# Altium schematic symbol library Mosfet.SchLib: 175 symbols (part 1 of 4)
Pins are listed as number, name and electrical type; pins without a type are passive.

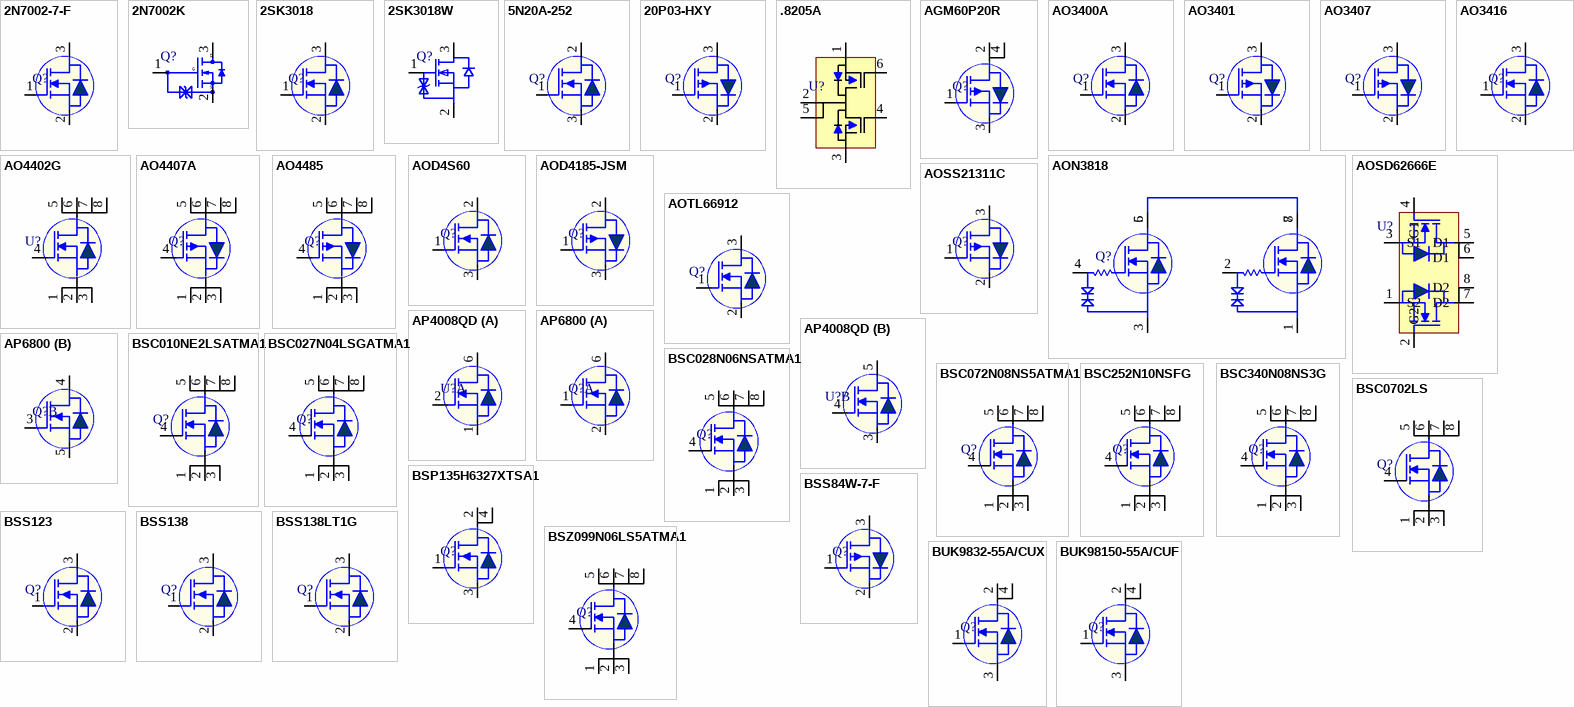
[diagram p0: symbols 2N7002-7-F to BUK98150-55A/CUF]

## 2N7002-7-F
designator Q?
MOSFET N-CH 60V 115MA SOT23-3; Manufacturer: Diodes; Manufacturer Part Number: 2N7002-7-F; Item Type: MOSFETs; Nominal Vgs: 2.5V; Max Power Dissipation: 300mW; Rds On Max: 7.5R; Input Capacitance: 50pF; Number of Elements: 1; Drain to Source Breakdown Voltage: 70V; Gate to Source Voltage (Vgs): 20V; Turn-Off Delay Time: 11ns; Turn-On Delay Time: 7ns; Power Dissipation: 540mW; Element Configuration: Single; Polarity: N-CHANNEL; Rise Time: 3ns; Fall Time: 5.6ns; Supplier 1: RSComponents; RoHS: Yes; Stock 1: 21000; Pricing 1: 3000=0.03200, 6000=0.03100, 15000=0.02900, 30000=0.02700 (GBP); Mount: Surface Mount; Case/Package: SOT-23; LCSC Part Number: C85049; Weight: 0.000282oz; Contact Plating: Tin,Matte; Min Operating Temperature: -55°C; Max Operating Temperature: 150°C; Drain to Source Voltage (Vdss): 60V; Continuous Drain Current (ID): 115mA; Packaging: Tape and Reel; Package Quantity: 3000; Dual Supply Voltage: 60V; Number of Channels: 1; Drain to Source Resistance: 7.5R; On-State Resistance: 7.5R; Threshold Voltage: 2.5V; Termination: SMD/SMT; Voltage Rating (DC): 60V; Current Rating: 115mA; Series: -; Drain-source On Resistance-Max: 7.5R; Voltage: 60V; Length: 2.9mm; Width: 1.3mm; Height: 1mm; Radiation Hardening: No; REACH SVHC: No SVHC; Lead Free: Lead Free; RoHS Compliant: Yes; ComponentLink1URL: https://datasheet.ciiva.com/15219/getdatasheetpartid-110059-15219667.pdf?src-supplier=Verical; ComponentLink1Description: https://datasheet.ciiva.com/15219/getdatasheetpartid-110059-15219667.pdf?src-supplier=Verical; ComponentLink2URL: https://datasheet.ciiva.com/3304/ds11303-3304385.pdf?src-supplier=Avnet; ComponentLink2Description: https://datasheet.ciiva.com/3304/ds11303-3304385.pdf?src-supplier=Avnet; ComponentLink3URL: https://datasheet.ciiva.com/1188/ds11303-1188363.pdf?src-supplier=Element14; ComponentLink3Description: https://datasheet.ciiva.com/1188/ds11303-1188363.pdf?src-supplier=Element14; ComponentLink4URL: https://datasheet.ciiva.com/22712/1915452-22712375.pdf?src-supplier=Element14; ComponentLink4Description: https://datasheet.ciiva.com/22712/1915452-22712375.pdf?src-supplier=Element14; ComponentLink5URL: https://datasheet.ciiva.com/49020/70437206-49020102.pdf?src-supplier=Allied+Electronics; ComponentLink5Description: https://datasheet.ciiva.com/49020/70437206-49020102.pdf?src-supplier=Allied+Electronics; Supplier Part Number 1: 1220588
footprint SOT-23 (TRANS NPN 40V 0.6A SOT23)
pins: 1 G, 2 S, 3 D

## 2N7002K
designator Q?
60V 300mA 350mW 2.2Ω@10V,0.3A 1.6V 1 N-channel SOT-23 MOSFETs ROHS; Manufacturer: MSKSEMI; Manufacturer Part Number: 2N7002K; Item Type: Mosfet; Package: SOT-23; LCSC Part Number: C3008053; ComponentLink1Description: LCSC; ComponentLink1URL: https://www.lcsc.com/product-detail/MOSFETs_MSKSEMI-2N7002K_C3008053.html?s_z=n_C3008053
footprint SOT-23 (TRANS NPN 40V 0.6A SOT23)
pins: 1 G, 2 S, 3 D

## 2SK3018
designator Q?
30V 100mA 200mW 8Ω@4V,10mA N Channel SOT-23 MOSFETs ROHS; Manufacturer: KUU; Manufacturer Part Number: 2SK3018; Item Type: MOSFET; Package: SOT-23; LCSC Part Number: C2944164; ComponentLink1Description: LCSC; ComponentLink1URL: https://www.lcsc.com/product-detail/MOSFETs_KUU-2SK3018_C2944164.html
footprint SOT-23 (TRANS NPN 40V 0.6A SOT23)
pins: 1 G, 2 S, 3 D

## 2SK3018W
designator Q?
30V 100mA 200mW 13Ω@2.5V,1mA 1.5V 1 N-channel SOT-323 MOSFETs ROHS; Manufacturer: TWGMC; Manufacturer Part Number: 2SK3018W; Item Type: Mosfet; Package: SOT-323; LCSC Part Number: C5273793; ComponentLink1Description: LCSC; ComponentLink1URL: https://www.lcsc.com/product-detail/MOSFETs_TWGMC-2SK3018W_C5273793.html?s_z=n_2SK3018T106
footprint SOT-323
pins: 1 G, 2 S, 3 D

## 5N20A-252
designator Q?
200V 5A 78W 580mΩ@10V,2.5A 3V@250uA N Channel TO-252-2(DPAK) MOSFETs ROHS; Manufacturer: GOFRD; Manufacturer Part Number: 5N20A-252; Item Type: Mosfet; Package: TO-252-2(DPAK); LCSC Part Number: C224101; ComponentLink1Description: LCSC; ComponentLink1URL: https://www.lcsc.com/product-detail/MOSFETs_GOFORD-5N20A-252_C224101.html
footprint DPAK
pins: 1 G, 2 D, 3 S

## 20P03-HXY
designator Q?
30V 20A 29W 39mΩ@10V,15A 2.5V@250uA P Channel 1345pF@15V TO-252-2L MOSFETs ROHS; Manufacturer: HXY MOSFET; Manufacturer Part Number: 20P03-HXY; Item Type: Mosfet; Package: TO-252-2L; LCSC Part Number: C4748750; ComponentLink1Description: LCSC; ComponentLink1URL: https://www.lcsc.com/product-detail/MOSFETs_HXY-MOSFET-20P03-HXY_C4748750.html
footprint 20P03-HXY
pins: 1 G, 2 S, 3 D

## .8205A
designator U?
20V 6A 22mΩ@4.5V,4.5A 2W 2PCSNChannel(Common Drain) SOT-23-6 MOSFETs ROHS; Manufacturer: Shenzhen Fuman Elec; Manufacturer Part Number: .8205A; Item Type: IC; ComponentLink1Description: LCSC; ComponentLink1URL: https://www.lcsc.com/product-detail/MOSFETs_Shenzhen-Fuman-Elec-8205A_C841290.html; Package: SOT-23-6; LCSC Part Number: C841290
footprint SOT-23-6
pins: 1 S1, 2 D, 3 S2, 4 G2, 5 D, 6 G1

## AGM60P20R
designator Q?
60V 10A 65mΩ@10V,5A 3W 1.8V@250uA 1 Piece P-Channel SOT-223 MOSFETs ROHS; Manufacturer: AGM-Semi; Manufacturer Part Number: AGM60P20R; Package: SOT-223; LCSC Part Number: C6719402; Item Type: MOSFETs; ComponentLink1Description: LCSC; ComponentLink1URL: https://www.lcsc.com/product-detail/MOSFETs_AGM-Semi-AGM60P20R_C6719402.html
footprint SOT- 223
pins: 1 G, 2 D, 3 S, 4 D

## AO3400A
designator Q?
30V 5.8A 32mΩ@10V,5.8A 1.4W 1.4V@250uA N Channel SOT-23 MOSFETs ROHS; Manufacturer: BORN; Manufacturer Part Number: AO3400A; Item Type: Mosfet; ComponentLink1Description: LCSC; ComponentLink1URL: https://www.lcsc.com/product-detail/MOSFETs_BORN-AO3400A_C344010.html; Footprint: SOT-23; LCSC Part Number: C344010
footprint sot-23
pins: 1 G, 2 S, 3 D

## AO3401
designator Q?
Trans Mosfet P-ch 30V 4A 3-PIN SOT-23 T/r; Manufacturer: Alpha & Omega Semiconductor; Manufacturer Part Number: AO3401A; Rds On Max: 44mR; Input Capacitance: 1.2nF; Max Power Dissipation: 1.4W; Number of Elements: 1; Supplier 1: Arrow Electronics; RoHS: Yes; Category: MOSFETs; Mount: Surface Mount; Case/Package: TO-236-3; Number of Pins: 3; Min Operating Temperature: -55°C; Max Operating Temperature: 150°C; Packaging: Tape and Reel; Drain to Source Voltage (Vdss): 30V; Continuous Drain Current (ID): 4A; Power Dissipation: 1.4W; Series: -; Radiation Hardening: No; RoHS Compliant: Yes; Lead Free: Lead Free; ComponentLink1URL: https://datasheet.ciiva.com/940/ao3401a-940720.pdf?src-supplier=Digi-Key; ComponentLink1Description: https://datasheet.ciiva.com/940/ao3401a-940720.pdf?src-supplier=Digi-Key; ComponentLink2URL: https://datasheet.ciiva.com/26927/getdatasheetpartid-79048-26927888.pdf?src-supplier=Verical; ComponentLink2Description: https://datasheet.ciiva.com/26927/getdatasheetpartid-79048-26927888.pdf?src-supplier=Verical; Supplier Part Number 1: AO3401A; LCSC Part Number: C181091; Item Type: Mosfet
footprint SOT-23 (TRANS NPN 40V 0.6A SOT23)
pins: 1 G, 2 S, 3 D

## AO3407
designator Q?
30V 4.1A 60mΩ@10V,4.1A 350mW 3V@250uA P Channel SOT-23 MOSFETs ROHS; Manufacturer: Guangdong Hottech; Manufacturer Part Number: AO3407; Item Type: Mosfet; Package: SOT-23; LCSC Part Number: C181093; ComponentLink1Description: LCSC; ComponentLink1URL: https://www.lcsc.com/product-detail/MOSFETs_Guangdong-Hottech-AO3407_C181093.html
footprint SOT-23 (TRANS NPN 40V 0.6A SOT23)
pins: 1 G, 2 S, 3 D

## AO3416
designator Q?
SOT-23 MOSFETs ROHS; Manufacturer Part Number: AO3416; Manufacturer: TECH PUBLIC; Item Type: Mosfet; Package: SOT-23; LCSC Part Number: C5123927; ComponentLink1Description: LCSC; ComponentLink1URL: https://www.lcsc.com/product-detail/MOSFETs_TECH-PUBLIC-AO3416_C5123927.html
footprint Sot-23 (TRANS NPN 40V 0.6A SOT23)
pins: 1 G, 2 S, 3 D

## AO4402G
designator U?
Mosfet N-ch 20V 20A 8SOIC; Manufacturer: Alpha & Omega Semiconductor; Manufacturer Part Number: AO4402G; Supplier: Digi-Key; Supplier Part Number: 785-AO4402GTR-ND; RoHS: No; Category: Transistors; Pricing: 3000=0.47628 (USD); LCSC Part Number: C2931062; Item Type: Mosfet; ComponentLink1Description: LCSC; ComponentLink1URL: https://www.lcsc.com/product-detail/MOSFETs_Alpha-Omega-Semicon-AO4402G_C2931062.html
footprint SOIC-8
pins: 1 S, 2 S, 3 S, 4 G, 5 D, 6 D, 7 D, 8 D

## AO4407A
designator Q?
30V 13A 9mΩ 1.5W 1V@250uA 1 piece P-channel SOP-8 MOSFETs ROHS; Manufacturer: JSMSEMI; Manufacturer Part Number: AO4407A; Item Type: Mosfet; Package: SOP-8; LCSC Part Number: C5155211; ComponentLink1Description: LCSC; ComponentLink1URL: https://www.lcsc.com/product-detail/MOSFETs_JSMSEMI-AO4407A_C5155211.html
footprint SOP-8
pins: 1 S, 2 S, 3 S, 4 G, 5 D, 6 D, 7 D, 8 D

## AO4485
designator Q?
MOSFET P-CH 40V 10A 8SOIC; Manufacturer: Alpha & Omega Semiconductor; Manufacturer Part Number: AO4485; Item Type: MOSFETs; Supplier: Digikey; LCSC Part Number: C51499; RoHS: Yes; Stock: 22089; Pricing: 1=0.89, 10=0.768, 100=0.5318, 500=0.44432, 1000=0.37814 (USD); ComponentLink1URL: https://datasheet.ciiva.com/26861/getdatasheetpartid-417133-26861485.pdf?src-supplier=Verical; ComponentLink1Description: https://datasheet.ciiva.com/26861/getdatasheetpartid-417133-26861485.pdf?src-supplier=Verical; ComponentLink2URL: https://datasheet.ciiva.com/6367/ao4485-6367585.pdf?src-supplier=Digikey; ComponentLink2Description: https://datasheet.ciiva.com/6367/ao4485-6367585.pdf?src-supplier=Digikey
footprint SOIC-8
pins: 1 S, 2 S, 3 S, 4 G, 5 D, 6 D, 7 D, 8 D

## AOD4S60
designator Q?
MOSFET N-CH 600V 4A TO252; Manufacturer: Alpha & Omega Semiconductor; Manufacturer Part Number: AOD4S60; Rds On Max: 900mR; Input Capacitance: 263pF; Max Power Dissipation: 56.8W; Supplier: Digikey; RoHS: Yes; Item Type: Mosfet; Stock: 4197; Pricing: 1=1.32, 10=1.08, 100=0.8399, 500=0.71192, 1000=0.57994 (USD); Mounting Technology: Surface Mount; Case/Package: TO-252-3; Packaging: Cut Tape; Drain to Source Voltage (Vdss): 600V; Continuous Drain Current (ID): 4A; Series: aMOS™; Package Quantity: 1; RoHS Compliant: Yes; ComponentLink1URL: https://datasheet.ciiva.com/6367/aod4s60-6367632.pdf?src-supplier=Digikey; ComponentLink1Description: https://datasheet.ciiva.com/6367/aod4s60-6367632.pdf?src-supplier=Digikey
footprint TO-252-2L
pins: 1 G, 2 D, 3 S

## AOD4185-JSM
designator Q?
40V 12A 11mΩ@10V,15A 6.3W 1.4V 1 piece P-channel TO-252 MOSFETs ROHS; Manufacturer: JSMSEMI; Manufacturer Part Number: AOD4185-JSM; Item Type: Mosfet; Package: TO-252; LCSC Part Number: C18189874; ComponentLink1Description: LCSC; ComponentLink1URL: https://www.lcsc.com/product-detail/MOSFETs_JSMSEMI-AOD4185-JSM_C18189874.html
footprint TO-252-2L
pins: 1 G, 2 D, 3 S

## AON3818
designator Q?
24V 8A 21mΩ@2.5V 2.7W 1.2V@250uA 2 N-Channel DFN-8(3x3) MOSFETs ROHS; Manufacturer: AOS; Manufacturer Part Number: AON3818; Item Type: Mosfet; Package: DFN-8(3x3); LCSC Part Number: C357850
footprint DFN-8(3x3)
pins: 1 S2, 2 G2, 3 S1, 4 G1, 5 D2, 6 D2, 7 D1, 8 D1

## AOSD62666E
designator U?
MOSFET 2N-CH 60V 9.5A 8SOIC; Manufacturer: Alpha & Omega Semiconductor; Manufacturer Part Number: AOSD62666E; Supplier: Digi-Key; Supplier Part Number: 785-1792-1-ND; RoHS: No; Category: Transistors; Stock: 12025; Pricing: 1=1.11, 10=0.911, 100=0.7084, 500=0.60046, 1000=0.48914 (USD); ComponentLink1URL: http://www.aosmd.com/res/data_sheets/AOSD62666E.pdf?src-supplier=Digi-Key; ComponentLink1Description: http://www.aosmd.com/res/data_sheets/AOSD62666E.pdf?src-supplier=Digi-Key; ComponentLink2URL: https://datasheet.octopart.com/AOSD62666E-Alpha-%26-Omega-Semiconductor-datasheet-136498378.pdf?src-supplier=LKR; ComponentLink2Description: https://datasheet.octopart.com/AOSD62666E-Alpha-%26-Omega-Semiconductor-datasheet-136498378.pdf?src-supplier=LKR; LCSC Part Number: C541719; Item Type: MOSFET
footprint SOIC-8
pins: 1 S2, 2 G2, 3 S1, 4 G1, 5 D1, 6 D1, 7 D2, 8 D2

## AOSS21311C
designator Q?
MOSFET P-CH 30V 4.3A SOT23-3; Manufacturer: Alpha & Omega Semiconductor; Manufacturer Part Number: AOSS21311C; Supplier: Digikey; Supplier Part Number: 785-AOSS21311CCT-ND; RoHS: Yes; Category: Transistors; Stock: 15013; Pricing: 1=0.44, 10=0.314, 100=0.1582, 500=0.14016, 1000=0.10908 (USD); LCSC Part Number: C3280149; Item Type: MOSFET
footprint SOT-23 (TRANS NPN 40V 0.6A SOT23)
pins: 1 G, 2 S, 3 D

## AOTL66912
designator Q?
MOSFET N-CH 100V 49A/380A TOLLA; Manufacturer: Alpha & Omega Semiconductor; Manufacturer Part Number: AOTL66912; Continuous Drain Current (ID): 380A; Drain to Source Resistance: 1.4mR; Gate to Source Voltage (Vgs): 20V; Number of Channels: 1NUMBER; Power Dissipation: 8.3W; Turn-Off Delay Time: 90ns; Turn-On Delay Time: 36ns; Supplier: Digikey; LCSC Part Number: C3291324; RoHS: Yes; Item Type: MOSFET; Stock: 5626; Pricing: 1=7.98, 10=5.427, 100=4.1846 (USD); Min Operating Temperature: -55°C; Max Operating Temperature: 175°C; Drain to Source Breakdown Voltage: 100V; Drain to Source Voltage (Vdss): 100V; Height: 2.4mm
footprint Tolla
pins: 1 G, 2 S, 3 D

## AP4008QD
designator U?
40V 20A 17mΩ@10V,10A 21W 1.6V@250uA 72pF@20V 2 N-Channel 1.05nF@20V 11nC@10V +150℃@(Tj) PDFN3x3; Manufacturer: ALLPOWER(ShenZhen Quan Li Semiconductor); Manufacturer Part Number: AP4008QD; ComponentLink1Description: LCSC; ComponentLink1URL: https://lcsc.com/product-detail/MOSFETs_ALLPOWER-ShenZhen-Quan-Li-Semiconductor-AP4008QD_C2828588.html; Footprint: PDFN3x3
footprint DFN-8(3.2x3.2)
part A pins: 1 S1, 2 G1, 6 D1
part B pins: 3 S2, 4 G2, 5 D2

## AP6800
designator Q?
30V 5.8A 22mΩ@10V,5.8A 1.2W 1V@250uA 2 N-Channel SOT-23-6 MOSFETs ROHS; Manufacturer: ALLPOWER(ShenZhen Quan Li Semiconductor); Manufacturer Part Number: AP6800; Item Type: Mosfet; Supplier: LCSC; LCSC Part Number: C2849570; RoHS: No
footprint SOT-23-6
part A pins: 1 G1, 2 S2, 6 D1
part B pins: 3 G2, 4 D2, 5 S1

## BSC010NE2LSATMA1
designator Q?
Mosfet N-ch 25V 39A TDSON-8 / Trans Mosfet N-ch 25V 39A Automotive 8-PIN Tdson Ep T/r; Manufacturer: Infineon; Manufacturer Part Number: BSC010NE2LSATMA1; Rise Time: 6ns; Gate to Source Voltage (Vgs): 20V; Rds On Max: 1mR; Input Capacitance: 4.7nF; Max Power Dissipation: 96W; Number of Elements: 1; Item Type: MOSFET; Supplier: Mouser; Supplier Part Number: 726-BSC010NE2LS; RoHS: Yes; Category: MOSFETs; Stock: 23008; Pricing: 1=1.65, 10=1.44, 50=1.44, 100=1.36, 1000=1.31, 10000=1.11 (USD); Mounting Technology: Surface Mount; Pins: 8; Contact Plating: Tin; Min Operating Temperature: -55°C; Max Operating Temperature: 150°C; Packaging: Tape and Reel; Continuous Drain Current (ID): 39A; Series: OptiMOS™; Power Dissipation: 96W; Max Dual Supply Voltage: 25V; Drain to Source Voltage (Vdss): 25V; Lead Free: Contains Lead; Halogen Free: Halogen Free; RoHS Compliant: Yes; ComponentLink1URL: https://datasheet.ciiva.com/11172/infineon-bsc010ne2ls-ds-v02-02-en-11172774.pdf?src-supplier=Avnet; ComponentLink1Description: https://datasheet.ciiva.com/11172/infineon-bsc010ne2ls-ds-v02-02-en-11172774.pdf?src-supplier=Avnet
footprint PG-TDSON-8-7
pins: 1 S, 2 S, 3 S, 4 G, 5 D, 6 D, 7 D, 8 D

## BSC027N04LSGATMA1
designator Q?
MOSFET N-CH 40V 24A/100A TDSON; Manufacturer: Infineon; Manufacturer Part Number: BSC027N04LSGATMA1; Rise Time: 5.6ns; Continuous Drain Current (ID): 24A; Rds On Max: 2.7mR; Input Capacitance: 6.8nF; Max Power Dissipation: 83W; Number of Elements: 1; Power Dissipation: 2.5W; Threshold Voltage: 2V; Gate to Source Voltage (Vgs): 20V; Supplier: Mouser; Supplier Part Number: 726-BSC027N04LSG; RoHS: Yes; Category: MOSFETs; Stock: 5079; Pricing: 1=1.5, 10=1.24, 50=1.24, 100=0.965, 1000=0.666, 10000=0.651 (USD); Mounting Technology: Surface Mount; Pins: 8; Contact Plating: Tin; Min Operating Temperature: -55°C; Max Operating Temperature: 150°C; Packaging: Tape and Reel; Drain to Source Voltage (Vdss): 40V; Series: OptiMOS™; Max Dual Supply Voltage: 40V; Radiation Hardening: No; Reach SVHC Compliant: No; Halogen Free: Halogen Free; RoHS Compliant: Yes; Lead Free: Contains Lead; ComponentLink1URL: https://datasheet.ciiva.com/8115/infineon-bsc027n04lsg-ds-v01-04-en-8115056.pdf?src-supplier=Avnet; ComponentLink1Description: https://datasheet.ciiva.com/8115/infineon-bsc027n04lsg-ds-v01-04-en-8115056.pdf?src-supplier=Avnet; Item Type: MOSFET
footprint PG-TDSON-8-1
pins: 1 S, 2 S, 3 S, 4 G, 5 D, 6 D, 7 D, 8 D

## BSC028N06NSATMA1
designator Q?
MOSFET N-CH 60V 23A/100A TDSON; Manufacturer: Infineon; Manufacturer Part Number: BSC028N06NSATMA1; Item Type: MOSFETs; Continuous Drain Current (ID): 100A; Rds On Max: 2.8mR; Input Capacitance: 2.7nF; Max Power Dissipation: 83W; Rise Time: 38ns; Turn-On Delay Time: 11ns; Turn-Off Delay Time: 19ns; Fall Time: 8ns; Gate to Source Voltage (Vgs): 20V; Polarity: N-CHANNEL; Supplier: Arrow Electronics; LCSC Part Number: C148250; RoHS: Yes; Stock: 20000; Pricing: 5000=0.8861 (USD); Pins: 8; Contact Plating: Tin; Min Operating Temperature: -55°C; Max Operating Temperature: 150°C; Drain to Source Voltage (Vdss): 60V; Series: OptiMOS™; Packaging: Tape and Reel; Package Quantity: 1; Drain to Source Breakdown Voltage: 60V; Drain to Source Resistance: 2.8mR; Power Dissipation: 83W; Max Dual Supply Voltage: 60V; On-State Resistance: 2.8mR; RoHS Compliant: Yes; Halogen Free: Halogen Free; Lead Free: Contains Lead; ComponentLink1URL: https://datasheet.ciiva.com/6369/infineon-bsc028n06ns-ds-v02-01-en-6369716.pdf?src-supplier=Digikey; ComponentLink1Description: https://datasheet.ciiva.com/6369/infineon-bsc028n06ns-ds-v02-01-en-6369716.pdf?src-supplier=Digikey; ComponentLink2URL: https://datasheet.ciiva.com/11172/infineon-bsc028n06ns-ds-v02-01-en-11172588.pdf?src-supplier=Avnet; ComponentLink2Description: https://datasheet.ciiva.com/11172/infineon-bsc028n06ns-ds-v02-01-en-11172588.pdf?src-supplier=Avnet; ComponentLink3URL: https://datasheet.ciiva.com/6369/infineon-bsc028n06ns-ds-v02-01-en-6369719.pdf?src-supplier=Digikey; ComponentLink3Description: https://datasheet.ciiva.com/6369/infineon-bsc028n06ns-ds-v02-01-en-6369719.pdf?src-supplier=Digikey; ComponentLink4URL: https://datasheet.ciiva.com/6369/infineon-bsc028n06ns-ds-v02-01-en-6369723.pdf?src-supplier=Digikey; ComponentLink4Description: https://datasheet.ciiva.com/6369/infineon-bsc028n06ns-ds-v02-01-en-6369723.pdf?src-supplier=Digikey
footprint PG-TDSON-8-7
pins: 1 S, 2 S, 3 S, 4 G, 5 D, 6 D, 7 D, 8 D

## BSC072N08NS5ATMA1
designator Q?
MOSFET N-CH 80V 74A 8TDSON; Manufacturer: Infineon; Manufacturer Part Number: BSC072N08NS5ATMA1; Rds On Max: 7.2mR; Input Capacitance: 2.1nF; Max Power Dissipation: 2.5W; Element Configuration: Single; Number of Channels: 1; Drain to Source Resistance: 10.4mR; Gate to Source Voltage (Vgs): 20V; Fall Time: 5ns; Rise Time: 7ns; Turn-Off Delay Time: 19ns; Turn-On Delay Time: 10ns; Supplier 1: Avnet; RoHS: Yes; Category: MOSFETs; Pricing 1: 5000=0.70449, 10000=0.68054, 20000=0.66110, 30000=0.64651, 40000=0.62221, 50000=0.60641, 500000=0.59061 (USD); Mount: Surface Mount; Number of Pins: 8; Weight: 0.01787oz; Min Operating Temperature: -55°C; Max Operating Temperature: 150°C; Packaging: Tape and Reel; Drain to Source Voltage (Vdss): 80V; Continuous Drain Current (ID): 74A; Package Quantity: 5000; Max Dual Supply Voltage: 80V; Lead Free: Contains Lead; Halogen Free: Halogen Free; ComponentLink1URL: http://www.mouser.com/ds/2/196/Infineon-BSC072N08NS5-DS-v02_00-EN-531318.pdf?src-supplier=Mouser; ComponentLink1Description: http://www.mouser.com/ds/2/196/Infineon-BSC072N08NS5-DS-v02_00-EN-531318.pdf?src-supplier=Mouser; ComponentLink2URL: https://www.infineon.com/dgdl/Infineon-BSC072N08NS5-DS-v02_00-EN.pdf?fileId=5546d4624ad04ef9014ae3d8e8192c7c&src-supplier=Digi-Key; ComponentLink2Description: https://www.infineon.com/dgdl/Infineon-BSC072N08NS5-DS-v02_00-EN.pdf?fileId=5546d4624ad04ef9014ae3d8e8192c7c&src-supplier=Digi-Key; Supplier Part Number 1: BSC072N08NS5ATMA1; LCSC Part Number: C3278732
footprint PG-TDSON-8-7
pins: 1 S, 2 S, 3 S, 4 G, 5 D, 6 D, 7 D, 8 D

## BSC252N10NSFG
designator Q?
TDSON-8-EP(5x6) MOSFETs ROHS; Manufacturer: Infineon; Manufacturer Part Number: BSC252N10NSFG; Rds On Max: 25.2mR; Input Capacitance: 1.1nF; Drain to Source Voltage (Vdss): 100V; Continuous Drain Current (ID): 40A; Max Power Dissipation: 78W; Gate to Source Voltage (Vgs): 20V; Rise Time: 21ns; Fall Time: 4ns; Turn-Off Delay Time: 16ns; Threshold Voltage: 3V; Turn-On Delay Time: 11ns; Supplier: Digikey; LCSC Part Number: C534427; RoHS: Yes; Stock: 14542; Pricing: 1=1.34, 10=1.095, 100=0.8514, 500=0.72164, 1000=0.58785, 2000=0.55339 (USD); Pins: 8; Min Operating Temperature: -55°C; Max Operating Temperature: 150°C; Packaging: Tape and Reel; Series: OptiMOS™; Package Quantity: 5000; Length: 5.35mm; Width: 6.35mm; Height: 1.1mm; RoHS Compliant: Yes; Reach SVHC Compliant: No; Halogen Free: Halogen Free; Item Type: MOSFETs
footprint PG-TDSON-8-1
pins: 1 S, 2 S, 3 S, 4 G, 5 D, 6 D, 7 D, 8 D

## BSC340N08NS3G
designator Q?
MOSFET N-CH 80V 7A/23A TDSON-8-5; Manufacturer: Infineon; Manufacturer Part Number: BSC340N08NS3G; Input Capacitance: 756pF; Max Power Dissipation: 32W; Rds On Max: 34mR; Continuous Drain Current (ID): 23A; Rise Time: 3ns; Turn-Off Delay Time: 11ns; Turn-On Delay Time: 8ns; Fall Time: 2ns; Gate to Source Voltage (Vgs): 20V; Supplier: Future Electronics; LCSC Part Number: C83511; RoHS: Yes; Stock: 70000; Pricing: 5000=0.235, 10000=0.23, 15000=0.225, 20000=0.225, 25000=0.22 (USD); Pins: 8; Min Operating Temperature: -55°C; Max Operating Temperature: 150°C; Packaging: Tape and Reel; Drain to Source Voltage (Vdss): 80V; Package Quantity: 1; Series: OptiMOS™; Length: 5.35mm; Width: 6.1mm; Height: 1.1mm; Halogen Free: Halogen Free; Lead Free: Lead Free; RoHS Compliant: Yes; ComponentLink1URL: https://datasheet.ciiva.com/951/infineon-bsc340n08ns3g-ds-v02-06-en-951160.pdf?src-supplier=Digikey; ComponentLink1Description: https://datasheet.ciiva.com/951/infineon-bsc340n08ns3g-ds-v02-06-en-951160.pdf?src-supplier=Digikey; Item Type: MOSFET
footprint PG-TDSON-8
pins: 1 S, 2 S, 3 S, 4 G, 5 D, 6 D, 7 D, 8 D

## BSC0702LS
designator Q?
MOSFET N-CH 60V 100A SUPERSO8; Manufacturer: Infineon; Manufacturer Part Number: BSC0702LSATMA1; Item Type: Transistor; Supplier 1: Digi-Key; RoHS: No; Category: MOSFETs; Stock 1: 9380; Pricing 1: 1=1.88000, 10=1.69000, 100=1.35800, 500=1.11572, 1000=0.92978 (USD); LCSC Part Number: C501503; Supplier Part Number 1: 448-BSC0702LSATMA1CT-ND; ComponentLink1Description: LCSC; ComponentLink1URL: https://www.lcsc.com/product-detail/MOSFETs_Infineon-Technologies-BSC0702LS_C501503.html
footprint PG-TDSON-8
pins: 1 S, 2 S, 3 S, 4 G, 5 D, 6 D, 7 D, 8 D

## BSP135H6327XTSA1
designator Q?
Trans MOSFET N-CH 600V 0.12A Automotive 4-Pin(3+Tab) SOT-223; Manufacturer: Infineon; Manufacturer Part Number: BSP135H6327XTSA1; Item Type: MOSFETs; Supplier: Mouser; LCSC Part Number: C3278599; RoHS: Yes; Stock: 85947; Pricing: 1=1.31, 10=1.08, 50=1.08, 100=0.837, 1000=0.577, 10000=0.563 (USD)
footprint SOT- 223
pins: 1 G, 2 D, 3 S, 4 D

## BSS84W-7-F
designator Q?
MOSFET P-CH 50V 130MA SOT323; Manufacturer: Diodes; Manufacturer Part Number: BSS84W-7-F; Supplier: Future Electronics; Supplier Part Number: 3204492; RoHS: Yes; Category: MOSFETs; Stock: 1359000; Pricing: 3000=0.415, 9000=0.405, 30000=0.39, 60000=0.385, 120000=0.375 (USD); ComponentLink1URL: https://datasheet.ciiva.com/17082/bss84w-7-f-17082780.pdf?src-supplier=Allied+Electronics; ComponentLink1Description: https://datasheet.ciiva.com/17082/bss84w-7-f-17082780.pdf?src-supplier=Allied+Electronics; ComponentLink2URL: https://datasheet.ciiva.com/15137/getdatasheetpartid-91759-15137729.pdf?src-supplier=Verical; ComponentLink2Description: https://datasheet.ciiva.com/15137/getdatasheetpartid-91759-15137729.pdf?src-supplier=Verical; ComponentLink3URL: https://datasheet.ciiva.com/19479/1539489-19479838.pdf?src-supplier=Jameco; ComponentLink3Description: https://datasheet.ciiva.com/19479/1539489-19479838.pdf?src-supplier=Jameco; ComponentLink4URL: https://datasheet.ciiva.com/4442/ds30205-79185-4442986.pdf?src-supplier=Mouser; ComponentLink4Description: https://datasheet.ciiva.com/4442/ds30205-79185-4442986.pdf?src-supplier=Mouser; ComponentLink5URL: https://datasheet.ciiva.com/8115/ds30205-8115434.pdf?src-supplier=Avnet; ComponentLink5Description: https://datasheet.ciiva.com/8115/ds30205-8115434.pdf?src-supplier=Avnet; ComponentLink6URL: https://datasheet.ciiva.com/934/ds30205-934605.pdf?src-supplier=Digi-Key; ComponentLink6Description: https://datasheet.ciiva.com/934/ds30205-934605.pdf?src-supplier=Digi-Key; ComponentLink7URL: https://datasheet.ciiva.com/934/ds30205-934606.pdf?src-supplier=Digi-Key; ComponentLink7Description: https://datasheet.ciiva.com/934/ds30205-934606.pdf?src-supplier=Digi-Key; ComponentLink8URL: https://datasheet.ciiva.com/934/ds30205-934607.pdf?src-supplier=Digi-Key; ComponentLink8Description: https://datasheet.ciiva.com/934/ds30205-934607.pdf?src-supplier=Digi-Key; ComponentLink9URL: https://datasheet.ciiva.com/1190/ds30205-1190308.pdf?src-supplier=Element14; ComponentLink9Description: https://datasheet.ciiva.com/1190/ds30205-1190308.pdf?src-supplier=Element14; ComponentLink10URL: https://datasheet.ciiva.com/8115/ds30205-8115325.pdf?src-supplier=Avnet; ComponentLink10Description: https://datasheet.ciiva.com/8115/ds30205-8115325.pdf?src-supplier=Avnet; LCSC Part Number: C110490; Item Type: Mosfet
footprint SOT-323
pins: 1 G, 2 S, 3 D

## BSS123
designator Q?
100V 200mA 300mW 1.06Ω@10V,200mA 3V@250uA N Channel SOT-23 MOSFETs ROHS; Manufacturer: BORN; Manufacturer Part Number: BSS123; Item Type: Mosfet; Package: SOT-23; LCSC Part Number: C431506; ComponentLink1Description: LCSC; ComponentLink1URL: https://www.lcsc.com/product-detail/MOSFETs_BORN-BSS123_C431506.html
footprint SOT-23 (TRANS NPN 40V 0.6A SOT23)
pins: 1 G, 2 S, 3 D

## BSS138
designator Q?
50V 220mA 3.5Ω@10V,220mA 225mW 1.6V@1mA N Channel SOT-23 MOSFETs ROHS; Manufacturer: Slkor(SLKORMICRO Elec.); Manufacturer Part Number: BSS138; Item Type: Mosfet; Package: SOT-23; LCSC Part Number: C426569; ComponentLink1Description: LCSC; ComponentLink1URL: https://www.lcsc.com/product-detail/MOSFETs_Slkor-SLKORMICRO-Elec-BSS138_C426569.html
footprint Sot-23 (TRANS NPN 40V 0.6A SOT23)
pins: 1 G, 2 S, 3 D

## BSS138LT1G
designator Q?
MOSFET N-CH 50V 200MA SOT-23; Manufacturer: ON Semiconductor; Manufacturer Part Number: BSS138LT1G; Gate to Source Voltage (Vgs): 20V; Nominal Vgs: 1.5V; Rds On Max: 3.5R; Input Capacitance: 50pF; Number of Elements: 1; Max Power Dissipation: 225mW; Turn-Off Delay Time: 20ns; Element Configuration: Single; ComponentLink1URL: https://datasheet.ciiva.com/22641/1596366-22641636.pdf; ComponentLink1Description: https://datasheet.ciiva.com/22641/1596366-22641636.pdf; ComponentLink2URL: https://datasheet.ciiva.com/1190/1596366-1190137.pdf; ComponentLink2Description: https://datasheet.ciiva.com/1190/1596366-1190137.pdf; ComponentLink3URL: https://datasheet.ciiva.com/15198/getdatasheetpartid-110266-15198908.pdf; ComponentLink3Description: https://datasheet.ciiva.com/15198/getdatasheetpartid-110266-15198908.pdf; ComponentLink4URL: https://datasheet.ciiva.com/8115/bss138lt1-d-8115295.pdf; ComponentLink4Description: https://datasheet.ciiva.com/8115/bss138lt1-d-8115295.pdf; ComponentLink5URL: https://datasheet.ciiva.com/8115/bss138lt1-d-8115358.pdf; ComponentLink5Description: https://datasheet.ciiva.com/8115/bss138lt1-d-8115358.pdf; ComponentLink6URL: https://datasheet.ciiva.com/1190/1596366-1190136.pdf; ComponentLink6Description: https://datasheet.ciiva.com/1190/1596366-1190136.pdf; ComponentLink7URL: https://datasheet.ciiva.com/936/bss138lt1-d-936802.pdf; ComponentLink7Description: https://datasheet.ciiva.com/936/bss138lt1-d-936802.pdf; ComponentLink8URL: https://datasheet.ciiva.com/936/bss138lt1-d-936801.pdf; ComponentLink8Description: https://datasheet.ciiva.com/936/bss138lt1-d-936801.pdf; ComponentLink9URL: https://datasheet.ciiva.com/14553/70099493-14553829.pdf; ComponentLink9Description: https://datasheet.ciiva.com/14553/70099493-14553829.pdf; ComponentLink10URL: https://datasheet.ciiva.com/936/bss138lt1-d-936803.pdf; ComponentLink10Description: https://datasheet.ciiva.com/936/bss138lt1-d-936803.pdf; Supplier 1: Digi-Key; Stock 1: 1283212; Pricing 1: 1=0.27, 10=0.222, 100=0.1177, 500=0.07746, 1000=0.05267 (USD); Case/Package: SOT-23-3; Number of Pins: 3; Contact Plating: Tin,Matte; Min Operating Temperature: -55°C; Max Operating Temperature: 150°C; Continuous Drain Current (ID): 200mA; Package Quantity: 1; Packaging: Tape and Reel; Drain to Source Breakdown Voltage: 50V; Power Dissipation: 225mW; Drain to Source Resistance: 3.5R; Threshold Voltage: 1.5V; Turn-On Delay Time: 20ns; Voltage Rating (DC): 50V; Current Rating: 200mA; On-State Resistance: 3.5R; Length: 3.04mm; Height: 1.01mm; Width: 1.4mm; Radiation Hardening: No; REACH SVHC: No SVHC; Lead Free: Lead Free; Halogen Free: Halogen Free; ComponentLink11URL: http://www.onsemi.com/pub/Collateral/BSS138LT1-D.PDF?src-supplier=Digi-Key; ComponentLink11Description: http://www.onsemi.com/pub/Collateral/BSS138LT1-D.PDF?src-supplier=Digi-Key; ComponentLink12URL: http://www.farnell.com/datasheets/1596366.pdf?src-supplier=Element14; ComponentLink12Description: http://www.farnell.com/datasheets/1596366.pdf?src-supplier=Element14; ComponentLink13URL: http://www.alliedelec.com/m/d/b3c6fd7d92596813fe75d33dcbaaae90.pdf?src-supplier=Allied+Electronics; ComponentLink13Description: http://www.alliedelec.com/m/d/b3c6fd7d92596813fe75d33dcbaaae90.pdf?src-supplier=Allied+Electronics; ComponentLink14URL: https://www.verical.com/server-webapp/html/getDatasheet?partID=110266&src-supplier=Verical; ComponentLink14Description: https://www.verical.com/server-webapp/html/getDatasheet?partID=110266&src-supplier=Verical; ComponentLink15URL: http://www.onsemi.com/pub_link/Collateral/BSS138LT1-D.PDF?src-supplier=Avnet; ComponentLink15Description: http://www.onsemi.com/pub_link/Collateral/BSS138LT1-D.PDF?src-supplier=Avnet; Supplier Part Number 1: BSS138LT1GOSDKR-ND; LCSC Part Number: C82045; Item Type: Mosfet
footprint SOT-23
pins: 1 G, 2 S, 3 D

## BSZ099N06LS5ATMA1
designator Q?
MOSFET N-CH 60V 46A TSDSON; Manufacturer: Infineon; Manufacturer Part Number: BSZ099N06LS5ATMA1; Item Type: IC; Supplier: Mouser; Supplier Part Number: 726-BSZ099N06LS5ATMA; RoHS: Yes; Category: MOSFETs; Stock: 54204; Pricing: 1=0.92, 10=0.704, 50=0.704, 100=0.572, 1000=0.382, 10000=0.346 (USD); Mounting Technology: Surface Mount; Pins: 8; Min Operating Temperature: -55°C; Max Dual Supply Voltage: 60V; Drain to Source Voltage (Vdss): 60V; Packaging: Tape and Reel; Series: *; RoHS Compliant: Yes; Lead Free: Contains Lead; Halogen Free: Halogen Free; ComponentLink1URL: https://www.infineon.com/dgdl/Infineon-BSZ099N06LS5-DS-v02_02-EN.pdf?fileId=5546d4625696ed760156e5d71c9f4f8e&src-supplier=Digikey; ComponentLink1Description: https://www.infineon.com/dgdl/Infineon-BSZ099N06LS5-DS-v02_02-EN.pdf?fileId=5546d4625696ed760156e5d71c9f4f8e&src-supplier=Digikey
footprint PG-TSDSON-8-FL
pins: 1 S, 2 S, 3 S, 4 G, 5 D, 6 D, 7 D, 8 D

## BUK9832-55A/CUX
designator Q?
MOSFET N-CH 55V 12A SOT223; Manufacturer: Nexperia; Manufacturer Part Number: BUK9832-55A/CUX; Item Type: MOSFETs; Input Capacitance: 1.594nF; Max Power Dissipation: 8W; Rds On Max: 29mR; Fall Time: 68ns; Gate to Source Voltage (Vgs): 10V; Rise Time: 125ns; Turn-Off Delay Time: 64ns; Turn-On Delay Time: 14ns; Supplier: Future Electronics; LCSC Part Number: C458151; RoHS: Yes; Stock: 59000; Pricing: 1000=0.305, 2000=0.295, 4000=0.29, 5000=0.29, 15000=0.275 (USD); Case/Package: 73Case; Pins: 4NUMBER; Contact Plating: 154ConductorMaterial; Min Operating Temperature: -55°C; Max Operating Temperature: 150°C; Packaging: 10Packaging; Continuous Drain Current (ID): 12A; Drain to Source Voltage (Vdss): 55V; Max Dual Supply Voltage: 55V; ComponentLink1URL: https://www.mouser.com/ds/2/302/BUK9832-55A-196161.pdf?src-supplier=Mouser; ComponentLink1Description: https://www.mouser.com/ds/2/302/BUK9832-55A-196161.pdf?src-supplier=Mouser; ComponentLink2URL: http://datasheet.octopart.com/BUK9832-55A-CUX-Nexperia-datasheet-87843131.pdf?src-supplier=Newark; ComponentLink2Description: http://datasheet.octopart.com/BUK9832-55A-CUX-Nexperia-datasheet-87843131.pdf?src-supplier=Newark; ComponentLink3URL: http://datasheet.octopart.com/BUK9832-55A-CUX-Nexperia-datasheet-87843131.pdf?src-supplier=Avnet; ComponentLink3Description: http://datasheet.octopart.com/BUK9832-55A-CUX-Nexperia-datasheet-87843131.pdf?src-supplier=Avnet; ComponentLink4URL: http://datasheet.octopart.com/BUK9832-55A-CUX-Nexperia-datasheet-87843131.pdf?src-supplier=Farnell; ComponentLink4Description: http://datasheet.octopart.com/BUK9832-55A-CUX-Nexperia-datasheet-87843131.pdf?src-supplier=Farnell; ComponentLink5URL: http://datasheet.octopart.com/BUK9832-55A-CUX-Nexperia-datasheet-87843131.pdf?src-supplier=Digikey; ComponentLink5Description: http://datasheet.octopart.com/BUK9832-55A-CUX-Nexperia-datasheet-87843131.pdf?src-supplier=Digikey; ComponentLink6URL: https://assets.nexperia.com/documents/data-sheet/BUK9832-55A.pdf?src-supplier=Digikey; ComponentLink6Description: https://assets.nexperia.com/documents/data-sheet/BUK9832-55A.pdf?src-supplier=Digikey; ComponentLink7URL: https://datasheet.octopart.com/BUK9832-55A-CUX-Nexperia-datasheet-87843131.pdf?src-supplier=Future+Electronics; ComponentLink7Description: https://datasheet.octopart.com/BUK9832-55A-CUX-Nexperia-datasheet-87843131.pdf?src-supplier=Future+Electronics; ComponentLink8URL: http://datasheet.octopart.com/BUK9832-55A-CUX-Nexperia-datasheet-87843131.pdf?src-supplier=TME; ComponentLink8Description: http://datasheet.octopart.com/BUK9832-55A-CUX-Nexperia-datasheet-87843131.pdf?src-supplier=TME; ComponentLink9URL: http://datasheet.octopart.com/BUK9832-55A-CUX-Nexperia-datasheet-87843131.pdf?src-supplier=Quest; ComponentLink9Description: http://datasheet.octopart.com/BUK9832-55A-CUX-Nexperia-datasheet-87843131.pdf?src-supplier=Quest; ComponentLink10URL: http://datasheet.octopart.com/BUK9832-55A-CUX-Nexperia-datasheet-87843131.pdf?src-supplier=TTI; ComponentLink10Description: http://datasheet.octopart.com/BUK9832-55A-CUX-Nexperia-datasheet-87843131.pdf?src-supplier=TTI
footprint SOT- 223
pins: 1 G, 2 D, 3 S, 4 D

## BUK98150-55A/CUF
designator Q?
MOSFET N-CH 55V 5.5A SOT223; Manufacturer: Nexperia; Manufacturer Part Number: BUK98150-55A/CUF; Max Power Dissipation: 8W; Input Capacitance: 320pF; Rds On Max: 137mR; Turn-Off Delay Time: 16ns; Turn-On Delay Time: 8ns; Rise Time: 57ns; Fall Time: 13ns; Gate to Source Voltage (Vgs): 15V; Supplier: Avnet; LCSC Part Number: C458219; RoHS: Yes; Item Type: MOSFET; Stock: 4000; Pricing: 8000=0.16099, 8100=0.15652, 20000=0.15205, 40000=0.14758, 200000=0.1431, 400000=0.13863 (USD); Case/Package: 73Case; Pins: 4NUMBER; Contact Plating: 154ConductorMaterial; Min Operating Temperature: -55°C; Max Operating Temperature: 150°C; Packaging: 10Packaging; Continuous Drain Current (ID): 5.5A; Drain to Source Voltage (Vdss): 55V; Max Dual Supply Voltage: 55V; Lead Free: 5697LeadFree; ComponentLink1URL: https://datasheet.octopart.com/BUK98150-55A-CUF-Nexperia-datasheet-25360387.pdf?src-supplier=Newark; ComponentLink1Description: https://datasheet.octopart.com/BUK98150-55A-CUF-Nexperia-datasheet-25360387.pdf?src-supplier=Newark; ComponentLink2URL: http://datasheet.octopart.com/BUK98150-55A-CUF-Nexperia-datasheet-87581157.pdf?src-supplier=Mouser; ComponentLink2Description: http://datasheet.octopart.com/BUK98150-55A-CUF-Nexperia-datasheet-87581157.pdf?src-supplier=Mouser; ComponentLink3URL: http://datasheet.octopart.com/BUK98150-55A-CUF-Nexperia-datasheet-87581157.pdf?src-supplier=Rs; ComponentLink3Description: http://datasheet.octopart.com/BUK98150-55A-CUF-Nexperia-datasheet-87581157.pdf?src-supplier=Rs; ComponentLink4URL: http://datasheet.octopart.com/BUK98150-55A-CUF-Nexperia-datasheet-87581157.pdf?src-supplier=Future+Electronics; ComponentLink4Description: http://datasheet.octopart.com/BUK98150-55A-CUF-Nexperia-datasheet-87581157.pdf?src-supplier=Future+Electronics; ComponentLink5URL: http://datasheet.octopart.com/BUK98150-55A-CUF-Nexperia-datasheet-87581157.pdf?src-supplier=TTI; ComponentLink5Description: http://datasheet.octopart.com/BUK98150-55A-CUF-Nexperia-datasheet-87581157.pdf?src-supplier=TTI
footprint SOT- 223
pins: 1 G, 2 D, 3 S, 4 D

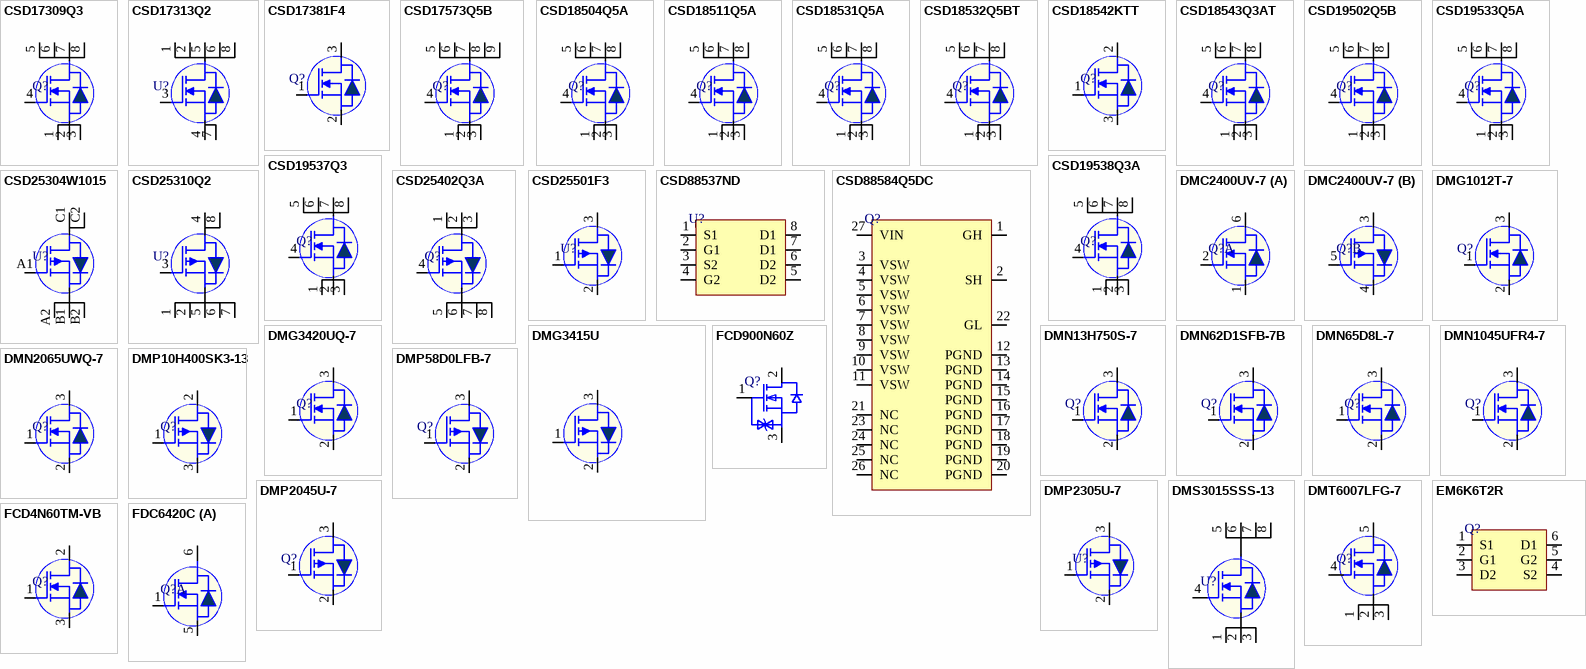
[diagram p1: symbols CSD17309Q3 to FDC6420C]

## CSD17309Q3
designator Q?
MOSFET N-CH 30V 20A/60A 8VSON; Manufacturer: Texas Instruments; Manufacturer Part Number: CSD17309Q3; Supplier: Mouser; Supplier Part Number: 595-CSD17309Q3; RoHS: Yes; Category: MOSFETs; Stock: 6648; Pricing: 1=0.95, 10=0.824, 50=0.824, 100=0.661, 1000=0.48, 10000=0.411 (USD); ComponentLink1URL: https://datasheet.ciiva.com/6381/csd17309q3-6381394.pdf?src-supplier=Digikey; ComponentLink1Description: https://datasheet.ciiva.com/6381/csd17309q3-6381394.pdf?src-supplier=Digikey; ComponentLink2URL: https://datasheet.ciiva.com/4438/slps261a-122188-4438334.pdf?src-supplier=Mouser; ComponentLink2Description: https://datasheet.ciiva.com/4438/slps261a-122188-4438334.pdf?src-supplier=Mouser; ComponentLink3URL: https://datasheet.ciiva.com/1255/csd17309q3-1255355.pdf?src-supplier=Newark; ComponentLink3Description: https://datasheet.ciiva.com/1255/csd17309q3-1255355.pdf?src-supplier=Newark; ComponentLink4URL: https://datasheet.ciiva.com/7968/1276211-7968248.pdf?src-supplier=Element14; ComponentLink4Description: https://datasheet.ciiva.com/7968/1276211-7968248.pdf?src-supplier=Element14; ComponentLink5URL: https://datasheet.ciiva.com/6381/csd17309q3-6381350.pdf?src-supplier=Digikey; ComponentLink5Description: https://datasheet.ciiva.com/6381/csd17309q3-6381350.pdf?src-supplier=Digikey; LCSC Part Number: C485528; Item Type: Mosfet
footprint 8-VSON-CLIP (3.3x3.3)
pins: 1 S, 2 S, 3 S, 4 G, 5 D, 6 D, 7 D, 8 D

## CSD17313Q2
designator U?
30V 5A 2.3W 30mΩ@4A,8V null WSON-6 MOSFETs ROHS; Manufacturer: Texas Instruments; Manufacturer Part Number: CSD17313Q2; Item Type: IC; Supplier: Mouser; Supplier Part Number: 595-CSD17313Q2; RoHS: Yes; Category: MOSFETs; Stock: 12528; Pricing: 1=0.59, 10=0.502, 50=0.502, 100=0.375, 1000=0.228, 10000=0.156 (USD); ComponentLink1URL: https://datasheet.ciiva.com/6388/csd17313q2-6388183.pdf?src-supplier=Digi-Key; ComponentLink1Description: https://datasheet.ciiva.com/6388/csd17313q2-6388183.pdf?src-supplier=Digi-Key; ComponentLink2URL: https://datasheet.ciiva.com/4438/slps260b-128048-4438543.pdf?src-supplier=Mouser; ComponentLink2Description: https://datasheet.ciiva.com/4438/slps260b-128048-4438543.pdf?src-supplier=Mouser; ComponentLink3URL: https://datasheet.ciiva.com/1255/csd17313q2-1255358.pdf?src-supplier=Newark; ComponentLink3Description: https://datasheet.ciiva.com/1255/csd17313q2-1255358.pdf?src-supplier=Newark; ComponentLink4URL: https://datasheet.ciiva.com/7968/1536237-7968249.pdf?src-supplier=Element14; ComponentLink4Description: https://datasheet.ciiva.com/7968/1536237-7968249.pdf?src-supplier=Element14; LCSC Part Number: C2863837
footprint CSD17313Q2 (6-WSON (2x2))
pins: 1 D, 2 D, 3 G, 4 S, 5 D, 6 D, 7 S, 8 D

## CSD17381F4
designator Q?
MOSFET N-CH 30V 3.1A 3PICOSTAR; Manufacturer: Texas Instruments; Manufacturer Part Number: CSD17381F4; Supplier: Mouser; Supplier Part Number: 595-CSD17381F4; RoHS: Yes; Category: MOSFETs; Stock: 2041; Pricing: 1=0.4, 10=0.302, 50=0.302, 100=0.129, 1000=0.102, 10000=0.076 (USD); ComponentLink1URL: https://datasheet.ciiva.com/30021/csd17381f4-30021939.pdf?src-supplier=Avnet; ComponentLink1Description: https://datasheet.ciiva.com/30021/csd17381f4-30021939.pdf?src-supplier=Avnet; ComponentLink2URL: https://datasheet.ciiva.com/18564/csd17381f4-18564922.pdf?src-supplier=Digi-Key; ComponentLink2Description: https://datasheet.ciiva.com/18564/csd17381f4-18564922.pdf?src-supplier=Digi-Key; Item Type: Mosfet
footprint PicoStar-3
pins: 1 G, 2 S, 3 D

## CSD17573Q5B
designator Q?
MOSFET N-CH 30V 100A 8VSON; Manufacturer: Texas Instruments; Manufacturer Part Number: CSD17573Q5B; Item Type: MOSFETs; Number of Channels: 1NUMBER; Power Dissipation: 3.2W; Supplier: Mouser; LCSC Part Number: C202231; RoHS: Yes; Stock: 570; Pricing: 1=1.9, 10=1.33, 50=1.33, 100=0.946, 1000=0.722, 10000=0.595 (USD); Drain to Source Breakdown Voltage: 30V; Length: 5mm; Width: 5mm; Thickness: 950um; Lead Free: 5698LeadFree; ComponentLink1URL: http://www.ti.com/general/docs/lit/getliterature.tsp?genericPartNumber=CSD17573Q5B&&fileType=pdf&src-supplier=Avnet; ComponentLink1Description: http://www.ti.com/general/docs/lit/getliterature.tsp?genericPartNumber=CSD17573Q5B&&fileType=pdf&src-supplier=Avnet; ComponentLink2URL: http://www.ti.com/general/docs/suppproductinfo.tsp?distId=10&amp;gotoUrl=http%3A%2F%2Fwww.ti.com%2Flit%2Fgpn%2Fcsd17573q5b&src-supplier=Digikey; ComponentLink2Description: http://www.ti.com/general/docs/suppproductinfo.tsp?distId=10&amp;gotoUrl=http%3A%2F%2Fwww.ti.com%2Flit%2Fgpn%2Fcsd17573q5b&src-supplier=Digikey; ComponentLink3URL: http://www.ti.com/lit/ds/symlink/csd17573q5b.pdf?src-supplier=Digikey; ComponentLink3Description: http://www.ti.com/lit/ds/symlink/csd17573q5b.pdf?src-supplier=Digikey; ComponentLink4URL: http://www.ti.com/lit/gpn/csd17573q5b?src-supplier=Mouser; ComponentLink4Description: http://www.ti.com/lit/gpn/csd17573q5b?src-supplier=Mouser
footprint PDFN-8(5x6)
pins: 1 S, 2 S, 3 S, 4 G, 5 D, 6 D, 7 D, 8 D, 9 D

## CSD18504Q5A
designator Q?
MOSFET N-CH 40V 15A/50A 8VSON; Manufacturer: Texas Instruments; Manufacturer Part Number: CSD18504Q5A; Supplier: Mouser; Supplier Part Number: 595-CSD18504Q5A; RoHS: Yes; Category: MOSFETs; Stock: 58587; Pricing: 1=1.09, 10=0.894, 50=0.894, 100=0.696, 1000=0.481, 10000=0.41 (USD); ComponentLink1URL: https://datasheet.ciiva.com/13063/csd18504q5a-123974-13063385.pdf?src-supplier=Mouser; ComponentLink1Description: https://datasheet.ciiva.com/13063/csd18504q5a-123974-13063385.pdf?src-supplier=Mouser; ComponentLink2URL: https://datasheet.ciiva.com/14192/csd18504q5a-14192913.pdf?src-supplier=Avnet; ComponentLink2Description: https://datasheet.ciiva.com/14192/csd18504q5a-14192913.pdf?src-supplier=Avnet; ComponentLink3URL: https://datasheet.ciiva.com/6386/csd18504q5a-6386886.pdf?src-supplier=Digikey; ComponentLink3Description: https://datasheet.ciiva.com/6386/csd18504q5a-6386886.pdf?src-supplier=Digikey; ComponentLink4URL: https://datasheet.ciiva.com/6386/csd18504q5a-6386887.pdf?src-supplier=Digikey; ComponentLink4Description: https://datasheet.ciiva.com/6386/csd18504q5a-6386887.pdf?src-supplier=Digikey; ComponentLink5URL: https://datasheet.ciiva.com/6386/csd18504q5a-6386888.pdf?src-supplier=Digikey; ComponentLink5Description: https://datasheet.ciiva.com/6386/csd18504q5a-6386888.pdf?src-supplier=Digikey; LCSC Part Number: C78118; Item Type: MOSFET
footprint 8-VSONP (5x6)
pins: 1 S, 2 S, 3 S, 4 G, 5 D, 6 D, 7 D, 8 D

## CSD18511Q5A
designator Q?
MOSFET N-CH 40V 159A 8VSON; Manufacturer: Texas Instruments; Manufacturer Part Number: CSD18511Q5A; Item Type: IC; Supplier: Mouser; LCSC Part Number: C701747; RoHS: Yes; Stock: 1551; Pricing: 1=1.08, 10=0.885, 50=0.885, 100=0.688, 1000=0.475, 10000=0.416 (USD); ComponentLink1URL: http://www.ti.com/general/docs/suppproductinfo.tsp?distId=10&amp;gotoUrl=http%3A%2F%2Fwww.ti.com%2Flit%2Fgpn%2Fcsd18511q5a&src-supplier=Digikey; ComponentLink1Description: http://www.ti.com/general/docs/suppproductinfo.tsp?distId=10&amp;gotoUrl=http%3A%2F%2Fwww.ti.com%2Flit%2Fgpn%2Fcsd18511q5a&src-supplier=Digikey; ComponentLink2URL: http://www.ti.com/lit/ds/symlink/csd18511q5a.pdf?src-supplier=Digikey; ComponentLink2Description: http://www.ti.com/lit/ds/symlink/csd18511q5a.pdf?src-supplier=Digikey
footprint 8-VSONP (5x6)
pins: 1 S, 2 S, 3 S, 4 G, 5 D, 6 D, 7 D, 8 D

## CSD18531Q5A
designator Q?
MOSFET N-CH 60V 19A/100A 8VSON; Manufacturer: Texas Instruments; Manufacturer Part Number: CSD18531Q5A; Item Type: MOSFETs; Number of Channels: 1NUMBER; Supplier: Mouser; LCSC Part Number: C2683366; RoHS: Yes; Stock: 2842; Pricing: 1=1.48, 10=1.22, 50=1.22, 100=0.944, 1000=0.652, 10000=0.558 (USD); Thickness: 1mm; ComponentLink1URL: https://datasheet.ciiva.com/6386/csd18531q5a-6386406.pdf?src-supplier=Digikey; ComponentLink1Description: https://datasheet.ciiva.com/6386/csd18531q5a-6386406.pdf?src-supplier=Digikey; ComponentLink2URL: https://datasheet.ciiva.com/13063/csd18531q5a-108247-13063440.pdf?src-supplier=Mouser; ComponentLink2Description: https://datasheet.ciiva.com/13063/csd18531q5a-108247-13063440.pdf?src-supplier=Mouser; ComponentLink3URL: https://datasheet.ciiva.com/23868/1762944-23868000.pdf?src-supplier=Newark; ComponentLink3Description: https://datasheet.ciiva.com/23868/1762944-23868000.pdf?src-supplier=Newark; ComponentLink4URL: https://datasheet.ciiva.com/14192/slps321b-14192915.pdf?src-supplier=Avnet; ComponentLink4Description: https://datasheet.ciiva.com/14192/slps321b-14192915.pdf?src-supplier=Avnet; ComponentLink5URL: https://datasheet.ciiva.com/22712/1733500-22712609.pdf?src-supplier=Element14; ComponentLink5Description: https://datasheet.ciiva.com/22712/1733500-22712609.pdf?src-supplier=Element14; ComponentLink6URL: https://datasheet.ciiva.com/6386/csd18531q5a-6386407.pdf?src-supplier=Digikey; ComponentLink6Description: https://datasheet.ciiva.com/6386/csd18531q5a-6386407.pdf?src-supplier=Digikey; ComponentLink7URL: https://datasheet.ciiva.com/6386/csd18531q5a-6386408.pdf?src-supplier=Digikey; ComponentLink7Description: https://datasheet.ciiva.com/6386/csd18531q5a-6386408.pdf?src-supplier=Digikey
footprint 8-VSONP (5x6)
pins: 1 S, 2 S, 3 S, 4 G, 5 D, 6 D, 7 D, 8 D

## CSD18532Q5BT
designator Q?
MOSFET N-CH 60V 100A 8VSON; Manufacturer: Texas Instruments; Manufacturer Part Number: CSD18532Q5BT; Item Type: MOSFETs; Supplier: Mouser; LCSC Part Number: C2876541; RoHS: Yes; Stock: 1375; Pricing: 1=2.24, 10=2.01, 50=2.01, 100=1.79, 1000=1.34, 10000=1.23 (USD); ComponentLink1URL: http://www.ti.com/general/docs/lit/getliterature.tsp?genericPartNumber=CSD18532Q5B&&fileType=pdf&src-supplier=Avnet; ComponentLink1Description: http://www.ti.com/general/docs/lit/getliterature.tsp?genericPartNumber=CSD18532Q5B&&fileType=pdf&src-supplier=Avnet; ComponentLink2URL: http://www.ti.com/general/docs/suppproductinfo.tsp?distId=10&amp;gotoUrl=http%3A%2F%2Fwww.ti.com%2Flit%2Fgpn%2Fcsd18532q5b&src-supplier=Digikey; ComponentLink2Description: http://www.ti.com/general/docs/suppproductinfo.tsp?distId=10&amp;gotoUrl=http%3A%2F%2Fwww.ti.com%2Flit%2Fgpn%2Fcsd18532q5b&src-supplier=Digikey; ComponentLink3URL: http://www.ti.com/lit/ds/symlink/csd18532q5b.pdf?src-supplier=Digikey; ComponentLink3Description: http://www.ti.com/lit/ds/symlink/csd18532q5b.pdf?src-supplier=Digikey; ComponentLink4URL: http://www.ti.com/lit/gpn/csd18532q5b?src-supplier=Mouser; ComponentLink4Description: http://www.ti.com/lit/gpn/csd18532q5b?src-supplier=Mouser
footprint SON-8(5x6)
pins: 1 S, 2 S, 3 S, 4 G, 5 D, 6 D, 7 D, 8 D

## CSD18542KTT
designator Q?
MOSFET N-CH 60V 200A DDPAK; Manufacturer: Texas Instruments; Manufacturer Part Number: CSD18542KTT; Item Type: IC; Supplier: Mouser; LCSC Part Number: C2867559; RoHS: Yes; Stock: 992; Pricing: 1=2.32, 10=1.93, 50=1.93, 100=1.54, 1000=1.1, 10000=1 (USD); ComponentLink1URL: http://www.ti.com/general/docs/suppproductinfo.tsp?distId=10&amp;gotoUrl=http%3A%2F%2Fwww.ti.com%2Flit%2Fgpn%2Fcsd18542ktt&src-supplier=Digikey; ComponentLink1Description: http://www.ti.com/general/docs/suppproductinfo.tsp?distId=10&amp;gotoUrl=http%3A%2F%2Fwww.ti.com%2Flit%2Fgpn%2Fcsd18542ktt&src-supplier=Digikey; ComponentLink2URL: http://www.ti.com/lit/ds/symlink/csd18542ktt.pdf?src-supplier=Digikey; ComponentLink2Description: http://www.ti.com/lit/ds/symlink/csd18542ktt.pdf?src-supplier=Digikey; ComponentLink3URL: http://www.ti.com/lit/gpn/csd18542ktt?src-supplier=Mouser; ComponentLink3Description: http://www.ti.com/lit/gpn/csd18542ktt?src-supplier=Mouser
footprint TO-263
pins: 1 G, 2 D, 3 S

## CSD18543Q3AT
designator Q?
MOSFET N-CH 60V 12A/60A 8VSON; Manufacturer: Texas Instruments; Manufacturer Part Number: CSD18543Q3AT; Item Type: IC; Drain to Source Resistance: 8.1mR; Gate to Source Voltage (Vgs): 20V; Number of Channels: 1NUMBER; Power Dissipation: 2.8W; Turn-Off Delay Time: 8ns; Turn-On Delay Time: 9ns; Supplier: Mouser; LCSC Part Number: C112374; RoHS: Yes; Stock: 4745; Pricing: 1=1.71, 10=1.17, 50=1.17, 100=0.713, 1000=0.588, 10000=0.574 (USD); Drain to Source Breakdown Voltage: 60V; Length: 3.3mm; Width: 3.3mm; Height: 900um; Thickness: 800um; ComponentLink1URL: http://www.ti.com/general/docs/lit/getliterature.tsp?genericPartNumber=CSD18543Q3A&fileType=pdf&src-supplier=Farnell; ComponentLink1Description: http://www.ti.com/general/docs/lit/getliterature.tsp?genericPartNumber=CSD18543Q3A&fileType=pdf&src-supplier=Farnell; ComponentLink2URL: http://www.ti.com/lit/ds/symlink/csd18543q3a.pdf?src-supplier=Digikey; ComponentLink2Description: http://www.ti.com/lit/ds/symlink/csd18543q3a.pdf?src-supplier=Digikey
footprint 8-VSON-CLIP (3.3x3.3)
pins: 1 S, 2 S, 3 S, 4 G, 5 D, 6 D, 7 D, 8 D

## CSD19502Q5B
designator Q?
MOSFET N-CH 80V 100A 8VSON; Manufacturer: Texas Instruments; Manufacturer Part Number: CSD19502Q5B; Package: 8-VSON-CLIP (5x6); LCSC Part Number: C2864118; Item Type: Mosfet; ComponentLink1Description: LCSC; ComponentLink1URL: https://jlcpcb.com/partdetail/TexasInstruments-CSD19502Q5B/C2864118
footprint VSON-CLIP-8(6x5)
pins: 1 S, 2 S, 3 S, 4 G, 5 D, 6 D, 7 D, 8 D